# Altium schematic symbol library ESP32-C5-MINI-1U.SchLib: 1 symbol
Pins are listed as number, name and electrical type; pins without a type are passive.

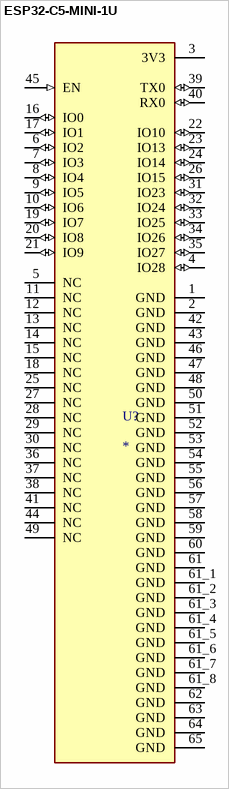
[diagram p0: symbol ESP32-C5-MINI-1U]

## ESP32-C5-MINI-1U
designator U?
Compact Wi-Fi 6 and Bluetooth 5.0 LE wireless module based on the ESP32-C5 SoC, featuring a 32-bit RISC-V single-core processor up to 240 MHz, 4 MB SPI flash, 2.4 GHz and 5 GHz dual-band Wi-Fi, IEEE 802.15.4 (Thread/Zigbee), and an external antenna connector (U.FL/IPEX). Integrated GPIO, SPI, UART, I2C, ADC, PWM and other peripherals. Designed for IoT, wireless communication, smart devices and embedded applications.
footprint ESP32-C5-MINI-1U
pins: 1 GND (power), 2 GND (power), 3 3V3 (power), 4 IO28 (io), 5 NC, 6 IO2 (io), 7 IO3 (io), 8 IO4 (io), 9 IO5 (io), 10 IO6 (io), 11 NC, 12 NC, 13 NC, 14 NC, 15 NC, 16 IO0 (io), 17 IO1 (io), 18 NC, 19 IO7 (io), 20 IO8 (io), 21 IO9 (io), 22 IO10 (io), 23 IO13 (io), 24 IO14 (io), 25 NC, 26 IO15 (io), 27 NC, 28 NC, 29 NC, 30 NC, 31 IO23 (io), 32 IO24 (io), 33 IO25 (io), 34 IO26 (io), 35 IO27 (io), 36 NC, 37 NC, 38 NC, 39 TX0 (io), 40 RX0 (io), 41 NC, 42 GND (power), 43 GND (power), 44 NC, 45 EN (in), 46 GND (power), 47 GND (power), 48 GND (power), 49 NC, 50 GND (power), 51 GND (power), 52 GND (power), 53 GND (power), 54 GND (power), 55 GND (power), 56 GND (power), 57 GND (power), 58 GND (power), 59 GND (power), 60 GND (power), 61 GND (power), 61_1 GND (power), 61_2 GND (power), 61_3 GND (power), 61_4 GND (power), 61_5 GND (power), 61_6 GND (power), 61_7 GND (power), 61_8 GND (power), 62 GND (power), 63 GND (power), 64 GND (power), 65 GND (power)